# Altium footprint library PHOENIX_1725698.PcbLib: 1 footprints
Each footprint in its own frame and in the unit in brackets; x right, y up, seen from the top. Pads: shape width x height; smd on the part's side, far side on the other; paste and mask are expansions set on the pad; w line width, h text height; cw(c..) or ccw(c..) is an arc to the next point about the centre after c.
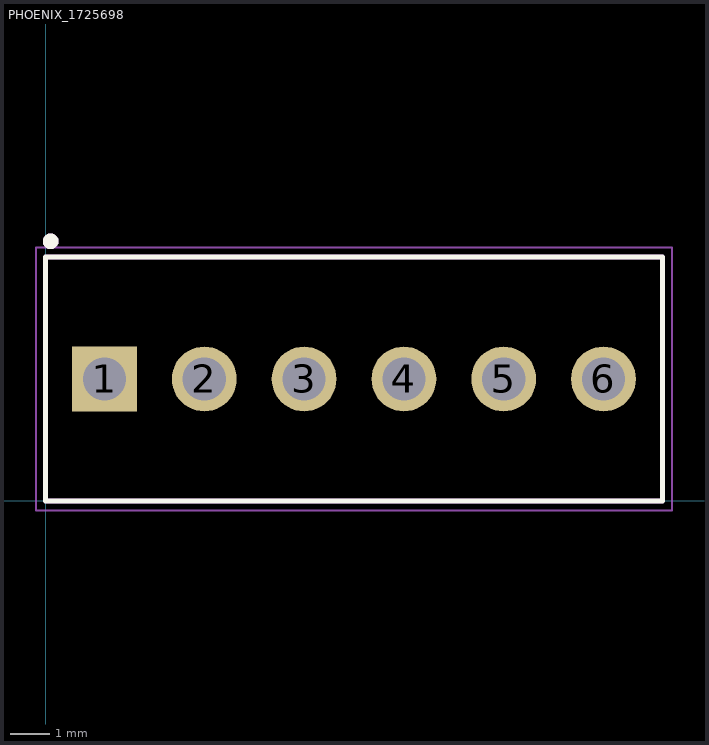
[diagram p0: the footprint, top view; thin cyan lines are the x and y axes]

## PHOENIX_1725698 [mm]
height 8.65
pads (6):
  rect 1.65x1.65 / inner round 1.65 / far side rect 1.65x1.65 hole 1.1: 1(1.5,3.1)
  round 1.65 hole 1.1: 2(4.04,3.1) 3(6.58,3.1) 4(9.12,3.1) 5(11.66,3.1) 6(14.2,3.1)
Top Overlay:
  circle w0.2: c0.127,6.604 r0.1
  lines w0.127: 0,0 0,6.2 15.7,6.2 15.7,0 0,0
Mechanical 13:
  circle w0.2: c0.127,6.604 r0.1
  lines w0.127: 0,0 0,6.2 15.7,6.2 15.7,0 0,0
Mechanical 15:
  lines w0.05: -0.25,-0.25 -0.25,6.45 15.95,6.45 15.95,-0.25 -0.25,-0.25
3D body "pxc_1725698_10_03_MPT-0-5-6-2-54_3D.stp": height 8.5, standoff -3.5, extent 0,-0.052 15.76,6.148